# Altium schematic symbol library Resistors.SchLib: 4 symbols
Pins are listed as number, name and electrical type; pins without a type are passive.

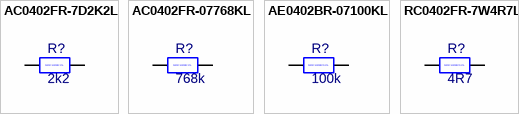
[diagram p0: symbols AC0402FR-7D2K2L to RC0402FR-7W4R7L]

## AC0402FR-7D2K2L
designator R?, comment 2k2
Thick Film Resistors - SMD 2.2 kOhms 1/16 W 50 V 1 % 0402 100 PPM / C - 55 C / + 155 C AEC-Q200 /; Manufacturer_Name: YAGEO; Manufacturer_Part_Number: AC0402FR-7D2K2L
footprint RES_0402 (0402 Chip Resistor, 2-Leads, Body 1,00x0,5mm, IPC Medium Density)
pins: 1, 2
text: 0402 1/16W 1%

## AC0402FR-07768KL
designator R?, comment 768k
Thick Film Resistors - SMD 768 kOhms 1/16 W 50 V 1 % 0402 100 PPM / C - 55 C / + 155 C AEC-Q200; Manufacturer_Name: YAGEO; Manufacturer_Part_Number: AC0402FR-07768KL; Datasheet Link: https://www.mouser.de/datasheet/3/508/1/PYu-AC_51_RoHS_L_11.pdf
footprint RES_0402 (0402 Chip Resistor, 2-Leads, Body 1,00x0,5mm, IPC Medium Density)
pins: 1, 2
text: 0402 1/16W 1%

## AE0402BR-07100KL
designator R?, comment 100k
Thick Film Resistors - SMD 100KOhm 0402 1/3W 0.1% Hal Free AEC-Q200; Manufacturer_Name: YAGEO; Manufacturer_Part_Number: AE0402BR-07100KL; Datasheet Link: https://yageogroup.com/content/datasheet/asset/file/PYU-AE_51_ROHS_L
footprint RES_0402 (0402 Chip Resistor, 2-Leads, Body 1,00x0,5mm, IPC Medium Density)
pins: 1, 2
text: 0402 1/16W 0.1%

## RC0402FR-7W4R7L
designator R?, comment 4R7
Thick Film Resistors - SMD General Purpose Chip Resistor 0402, 4.7Ohms, 1%, 1/16W; Manufacturer_Name: YAGEO; Manufacturer_Part_Number: RC0402FR-7W4R7L
footprint RES_0402 (0402 Chip Resistor, 2-Leads, Body 1,00x0,5mm, IPC Medium Density)
pins: 1, 2
text: 0402 1/16W 0.1%